# Altium schematic symbol library GRM21BR71A106KA73L.SchLib: 1 symbol
Pins are listed as number, name and electrical type; pins without a type are passive.

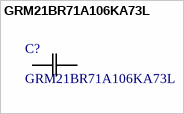
[diagram p0: symbol GRM21BR71A106KA73L]

## GRM21BR71A106KA73L
designator C?
Description; Manufacturer_Name: Murata; Type: Ceramic Capacitors; Copyright: Copyright (C) 2025 Ultra Librarian. All rights reserved.; Manufacturer_Part_Number: GRM21BR71A106KA73L
footprint CAP_GRM21_2p15X1p4X1p4_MUR
pins: 1, 2